# Altium footprint library 1.10-电容.PcbLib: 193 footprints (part 12 of 13)
Each footprint in its own frame and in the unit in brackets; x right, y up, seen from the top. Pads: shape width x height; smd on the part's side, far side on the other; paste and mask are expansions set on the pad; w line width, h text height; cw(c..) or ccw(c..) is an arc to the next point about the centre after c.
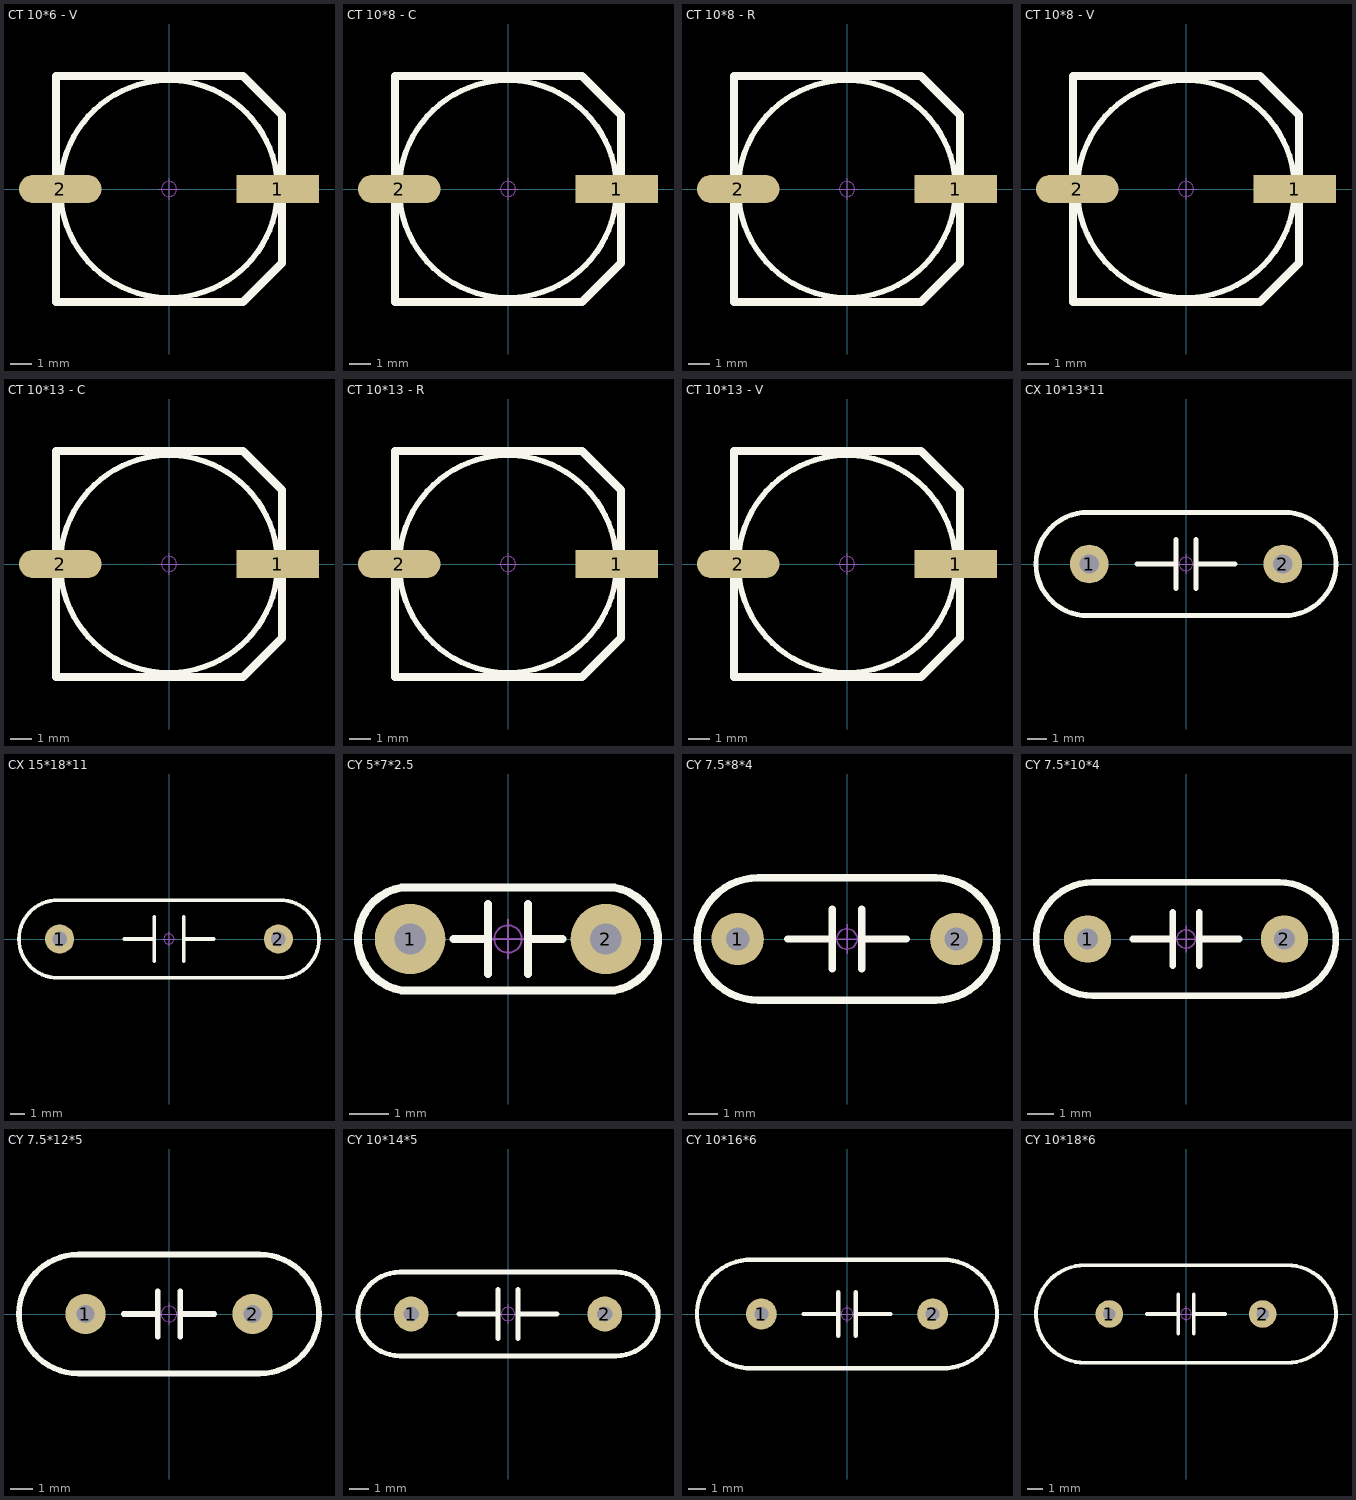
[diagram p11: the footprints below, top view; thin cyan lines are the x and y axes]

## CT 10*6 - V [mm] "直径10mm，高6mm                     淘宝ID:黄晶宝石"
pads (2):
  rect 3.8x1.3 smd: 1(5,0)
  oval 3.8x1.3 smd: 2(-5,0)
Top Overlay:
  circle w0.254: c0,0 r5
  lines w0.381: 5.191,-3.413 3.404,-5.2 -5.2,-5.2 -5.2,5.2 3.404,5.2 5.2,3.404 5.2,-3.404
Mechanical 15:
  circle w0.05: c0,0 r0.35
  lines w0.05: -0.5,0 0.5,0 ; 0,-0.5 0,0.5
3D body "CT 10X6-V.STEP": height 6, standoff -0.01, extent -5.8,-5.15 5.8,5.15

## CT 10*8 - C [mm] "直径10mm，高8mm"
pads (2):
  rect 3.8x1.3 smd: 1(5,0)
  oval 3.8x1.3 smd: 2(-5,0)
Top Overlay:
  circle w0.254: c0,0 r5
  lines w0.381: 5.191,-3.413 3.404,-5.2 -5.2,-5.2 -5.2,5.2 3.404,5.2 5.2,3.404 5.2,-3.404
Mechanical 15:
  circle w0.05: c0,0 r0.35
  lines w0.05: -0.5,0 0.5,0 ; 0,-0.5 0,0.5
3D body "CT 10X8-C.STEP": height 8, standoff -0.01, extent -5.8,-5.15 5.8,5.15

## CT 10*8 - R [mm] "直径10mm，高8mm                            淘宝ID:黄晶宝石"
pads (2):
  rect 3.8x1.3 smd: 1(5,0)
  oval 3.8x1.3 smd: 2(-5,0)
Top Overlay:
  circle w0.254: c0,0 r5
  lines w0.381: 5.191,-3.413 3.404,-5.2 -5.2,-5.2 -5.2,5.2 3.404,5.2 5.2,3.404 5.2,-3.404
Mechanical 15:
  circle w0.05: c0,0 r0.35
  lines w0.05: -0.5,0 0.5,0 ; 0,-0.5 0,0.5
3D body "CT 10X8-R.STEP": height 8, standoff -0.01, extent -5.8,-5.15 5.8,5.15

## CT 10*8 - V [mm] "直径10mm，高8mm"
pads (2):
  rect 3.8x1.3 smd: 1(5,0)
  oval 3.8x1.3 smd: 2(-5,0)
Top Overlay:
  circle w0.254: c0,0 r5
  lines w0.381: 5.191,-3.413 3.404,-5.2 -5.2,-5.2 -5.2,5.2 3.404,5.2 5.2,3.404 5.2,-3.404
Mechanical 15:
  circle w0.05: c0,0 r0.35
  lines w0.05: -0.5,0 0.5,0 ; 0,-0.5 0,0.5
3D body "CT 10X8-V.STEP": height 8, standoff -0.01, extent -5.8,-5.15 5.8,5.15

## CT 10*13 - C [mm] "直径10mm，高13mm                   淘宝ID:黄晶宝石"
pads (2):
  rect 3.8x1.3 smd: 1(5,0)
  oval 3.8x1.3 smd: 2(-5,0)
Top Overlay:
  circle w0.254: c0,0 r5
  lines w0.381: 5.191,-3.413 3.404,-5.2 -5.2,-5.2 -5.2,5.2 3.404,5.2 5.2,3.404 5.2,-3.404
Mechanical 15:
  circle w0.05: c0,0 r0.35
  lines w0.05: -0.5,0 0.5,0 ; 0,-0.5 0,0.5
3D body "CT 10X13-C.STEP": height 13, standoff -0.01, extent -5.8,-5.15 5.8,5.15

## CT 10*13 - R [mm] "直径10mm，高13mm                       淘宝ID:黄晶宝石"
pads (2):
  rect 3.8x1.3 smd: 1(5,0)
  oval 3.8x1.3 smd: 2(-5,0)
Top Overlay:
  circle w0.254: c0,0 r5
  lines w0.381: 5.191,-3.413 3.404,-5.2 -5.2,-5.2 -5.2,5.2 3.404,5.2 5.2,3.404 5.2,-3.404
Mechanical 15:
  circle w0.05: c0,0 r0.35
  lines w0.05: -0.5,0 0.5,0 ; 0,-0.5 0,0.5
3D body "CT 10X13-R.STEP": height 13, standoff -0.01, extent -5.8,-5.15 5.8,5.15

## CT 10*13 - V [mm] "直径10mm，高13mm                           淘宝ID:黄晶宝石"
pads (2):
  rect 3.8x1.3 smd: 1(5,0)
  oval 3.8x1.3 smd: 2(-5,0)
Top Overlay:
  circle w0.254: c0,0 r5
  lines w0.381: 5.191,-3.413 3.404,-5.2 -5.2,-5.2 -5.2,5.2 3.404,5.2 5.2,3.404 5.2,-3.404
Mechanical 15:
  circle w0.05: c0,0 r0.35
  lines w0.05: -0.5,0 0.5,0 ; 0,-0.5 0,0.5
3D body "CT 10X13-V.STEP": height 13, standoff -0.01, extent -5.8,-5.15 5.8,5.15

## CX 10*13*11 [mm] "脚距10mm高13mm厚11mm                    淘宝ID:黄晶宝石"
pads (2):
  round 2 hole 1: 1(-5,0) 2(5,0)
Top Overlay:
  lines w0.254: -2.54,0 -0.604,0 ; -0.508,-1.27 -0.508,1.27 ; 0.508,-1.27 0.508,1.27 ; 0.508,0 2.54,0 ; -5.08,-2.667 cw(c-5.08,0) -5.08,2.667 5.08,2.667 cw(c5.08,0) 5.08,-2.667 -5.08,-2.667
Mechanical 15:
  circle w0.05: c0,0 r0.35
  lines w0.05: -0.5,0 0.5,0 ; 0,-0.5 0,0.5
3D body "CX 10X13X11.STEP": height 11.02, standoff -3.48, extent -6.5,-2.5 6.5,2.5

## CX 15*18*11 [mm] "脚距15mm高18mm厚11mm"
pads (2):
  round 2 hole 1: 1(-7.5,0) 2(7.5,0)
Top Overlay:
  lines w0.254: -3.048,0 -1.016,0 ; -1.016,-1.524 -1.016,1.524 ; 1.016,-1.524 1.016,1.524 ; 1.016,0 3.048,0 ; -7.62,-2.667 cw(c-7.62,0) -7.62,2.667 7.62,2.667 cw(c7.62,0) 7.62,-2.667 -7.62,-2.667
Mechanical 15:
  circle w0.05: c0,0 r0.35
  lines w0.05: -0.5,0 0.5,0 ; 0,-0.5 0,0.5
3D body "CX 15X18X11.STEP": height 11.02, standoff -3.48, extent -9,-2.5 9,2.5

## CY 5*7*2.5 [mm] "脚距5mm，直径7mm，厚2.5mm"
pads (2):
  round 1.8 hole 0.8: 1(-2.5,0) 2(2.5,0)
Top Overlay:
  lines w0.203: -1.397,0 -0.508,0 ; -0.508,-0.889 -0.508,0.889 ; 0.508,-0.889 0.508,0.889 ; 0.508,0 1.397,0 ; -2.726,1.313 ccw(c-2.5,0) -2.726,-1.313 2.726,-1.313 2.726,-1.313 ccw(c2.5,0) 2.726,1.313 -2.726,1.313 -2.726,1.313
Mechanical 15:
  circle w0.05: c0,0 r0.35
  lines w0.05: -0.5,0 0.5,0 ; 0,-0.5 0,0.5
3D body "CY 5X7X2.5.STEP": height 7, standoff -3.5, extent -3.5,-1.25 3.5,1.25

## CY 7.5*8*4 [mm] "脚距7.5mm，直径8mm，厚4mm"
pads (2):
  round 1.8 hole 0.8: 1(-3.75,0) 2(3.75,0)
Top Overlay:
  lines w0.254: -2.032,0 -0.508,0 ; -0.508,-1.016 -0.508,1.016 ; 0.508,-1.016 0.508,1.016 ; 0.508,0 2.032,0 ; -3.048,-2.1 cw(c-3.048,0) -3.048,2.1 3.048,2.1 cw(c3.048,0) 3.048,-2.1 -3.048,-2.1
Mechanical 15:
  circle w0.05: c0,0 r0.35
  lines w0.05: -0.5,0 0.5,0 ; 0,-0.5 0,0.5
3D body "CY 7.5X8X4.STEP": height 8.2, standoff -3.3, extent -4.042,-2 4.042,2

## CY 7.5*10*4 [mm] "脚距7.5mm，直径10mm，厚4mm"
pads (2):
  round 1.8 hole 0.8: 1(-3.75,0) 2(3.75,0)
Top Overlay:
  lines w0.254: -2.032,0 -0.508,0 ; -0.508,-1.016 -0.508,1.016 ; 0.508,-1.016 0.508,1.016 ; 0.508,0 2.032,0 ; -3.556,-2.159 cw(c-3.556,0) -3.556,2.159 3.556,2.159 cw(c3.556,0) 3.556,-2.159 -3.556,-2.159
Mechanical 15:
  circle w0.05: c0,0 r0.35
  lines w0.05: -0.5,0 0.5,0 ; 0,-0.5 0,0.5
3D body "CY 7.5X10X4.STEP": height 10.2, standoff -3.3, extent -4.88,-2 5.12,2

## CY 7.5*12*5 [mm] "脚距7.5mm，直径12mm，厚5mm                 淘宝ID:黄晶宝石"
pads (2):
  round 1.8 hole 0.8: 1(-3.75,0) 2(3.75,0)
Top Overlay:
  lines w0.254: -2.032,0 -0.508,0 ; -0.508,-1.016 -0.508,1.016 ; 0.508,-1.016 0.508,1.016 ; 0.508,0 2.032,0 ; -4.064,-2.667 cw(c-4.064,0) -4.064,2.667 4.064,2.667 cw(c4.064,0) 4.064,-2.667 -4.064,-2.667
Mechanical 15:
  circle w0.05: c0,0 r0.35
  lines w0.05: -0.5,0 0.5,0 ; 0,-0.5 0,0.5
3D body "CY 7.5X12X5.STEP": height 12.2, standoff -3.3, extent -6,-2.5 6,2.5

## CY 10*14*5 [mm] "脚距10mm，直径14mm，厚5mm"
pads (2):
  round 1.8 hole 0.8: 1(-5,0) 2(5,0)
Top Overlay:
  lines w0.254: -2.54,0 -0.604,0 ; -0.508,-1.27 -0.508,1.27 ; 0.508,-1.27 0.508,1.27 ; 0.508,0 2.54,0 ; -5.588,-2.159 cw(c-5.588,0) -5.588,2.159 5.588,2.159 cw(c5.588,0) 5.588,-2.159 -5.588,-2.159
Mechanical 15:
  circle w0.05: c0,0 r0.35
  lines w0.05: -0.5,0 0.5,0 ; 0,-0.5 0,0.5
3D body "CY 10X14X5.STEP": height 14.2, standoff -3.3, extent -7,-2 7,2

## CY 10*16*6 [mm] "脚距10mm，直径16mm，厚6mm      淘宝ID:黄晶宝石"
pads (2):
  round 1.8 hole 0.8: 1(-5,0) 2(5,0)
Top Overlay:
  lines w0.254: -2.54,0 -0.604,0 ; -0.508,-1.27 -0.508,1.27 ; 0.508,-1.27 0.508,1.27 ; 0.508,0 2.54,0 ; -5.588,-3.175 cw(c-5.588,0) -5.588,3.175 5.588,3.175 cw(c5.588,0) 5.588,-3.175 -5.588,-3.175
Mechanical 15:
  circle w0.05: c0,0 r0.35
  lines w0.05: -0.5,0 0.5,0 ; 0,-0.5 0,0.5
3D body "CY 10X16X6.STEP": height 16.2, standoff -3.3, extent -8,-3 8,3

## CY 10*18*6 [mm] "脚距10mm，直径18mm，厚6mm      淘宝ID:黄晶宝石"
pads (2):
  round 1.8 hole 0.8: 1(-5,0) 2(5,0)
Top Overlay:
  lines w0.254: -2.54,0 -0.604,0 ; -0.508,-1.27 -0.508,1.27 ; 0.508,-1.27 0.508,1.27 ; 0.508,0 2.54,0 ; -6.604,-3.175 cw(c-6.604,0) -6.604,3.175 6.604,3.175 cw(c6.604,0) 6.604,-3.175 -6.604,-3.175
Mechanical 15:
  circle w0.05: c0,0 r0.35
  lines w0.05: -0.5,0 0.5,0 ; 0,-0.5 0,0.5
3D body "CY 10X18X6.STEP": height 18.2, standoff -3.3, extent -9,-3 9,3